# Altium footprint library MAX17222ELTT.PcbLib: 1 footprints
Each footprint in its own frame and in the unit in brackets; x right, y up, seen from the top. Pads: shape width x height; smd on the part's side, far side on the other; paste and mask are expansions set on the pad; w line width, h text height; cw(c..) or ccw(c..) is an arc to the next point about the centre after c.
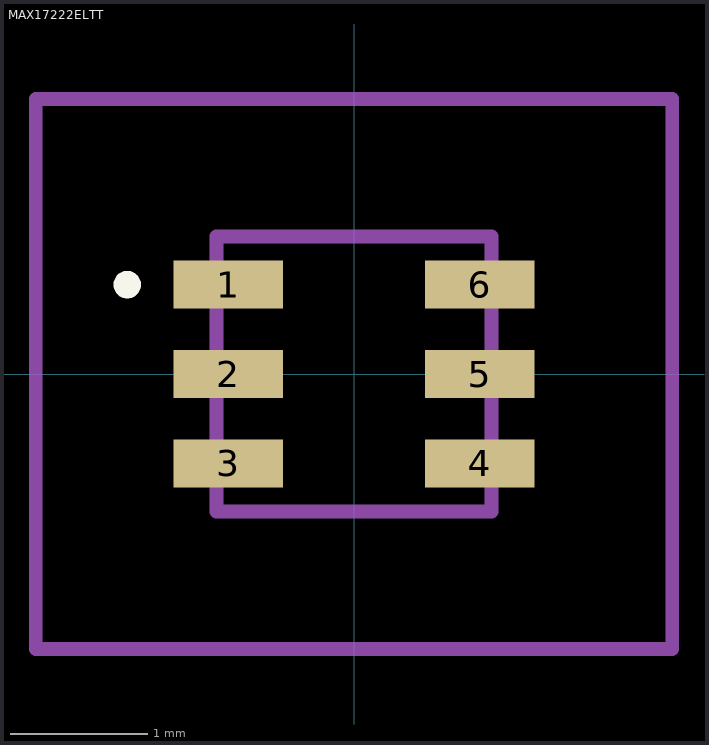
[diagram p0: the footprint, top view; thin cyan lines are the x and y axes]

## MAX17222ELTT [mm]
pads (6):
  rect 0.8x0.35 smd: 1(-0.915,0.65) 2(-0.915,0) 3(-0.915,-0.65) 4(0.915,-0.65) 5(0.915,0) 6(0.915,0.65)
Top Overlay:
  lines w0.1: -1.7,0.65 -1.7,0.65 ; -1.7,0.65 ccw(c-1.65,0.65) -1.6,0.65 ; -1.7,0.65 cw(c-1.65,0.65) -1.6,0.65 ; -1.6,0.65 -1.6,0.65
Mechanical 15:
  lines w0.1: -1,-1 1,-1 1,1 -1,1 -1,-1
Mechanical 20:
  lines w0.1: -2.315,-2 2.315,-2 2.315,2 -2.315,2 -2.315,-2